# Altium integrated library VIETTIEN.IntLib: 167 symbols (part 4 of 8)

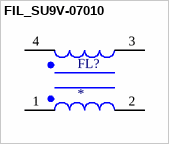
[diagram p69: symbol FIL_SU9V-07010]

## FIL_SU9V-07010
designator FL?
1 mH @ 1 kHz 2 Line Common Mode Choke Through Hole 700mA DCR 600mOhm; MF: Kemet; MP: SU9V-07010; SnapEDA_Link: https://www.snapeda.com/parts/SU9V-07010/Kemet/view-part/?ref=snap; Package: Vertical-4 Kemet; Value: *; Check_prices: https://www.snapeda.com/parts/SU9V-07010/Kemet/view-part/?ref=eda
footprint FIL_SU9V-07010
pins: 1, 2, 3, 4


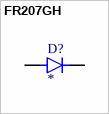
[diagram p70: symbol FR207GH]

## FR207GH
designator D?
500ns, 2A, 1000V, Fast Recovery Rectifier; MF: Taiwan Semiconductor Corporation; MP: FR207GH; SnapEDA_Link: https://www.snapeda.com/parts/FR207GH/Taiwan+Semiconductor/view-part/?ref=snap; Package: DO-15 Taiwan Semiconductor; Value: *; Check_prices: https://www.snapeda.com/parts/FR207GH/Taiwan+Semiconductor/view-part/?ref=eda
footprint DIOAD1300W80L670D310
pins: A, C K


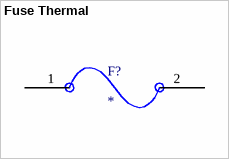
[diagram p71: symbol Fuse Thermal]

## Fuse Thermal
designator F?
Fuse, Resettable, Fast Acting, 10A, Sz 1206, 0.134x0.071x0.033", SMT, 24VDC, PCB | Bourns MF-NSMF200-2
footprint Fuse_thermal
pins: 1, 2


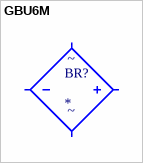
[diagram p72: symbol GBU6M]

## GBU6M
designator BR?
Bridge Rectifier Single Phase Standard 1 kV Through Hole GBU; MF: ON Semiconductor; MP: GBU6M; SnapEDA_Link: https://www.snapeda.com/parts/GBU6M/Onsemi/view-part/?ref=snap; Package: SIP-4 ON Semiconductor; Value: *; Check_prices: https://www.snapeda.com/parts/GBU6M/Onsemi/view-part/?ref=eda
footprint GBU_4L
pins: 1 (io), 2 (io), 3 (io), 4 (io)
text: ~


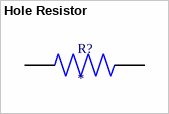
[diagram p73: symbol Hole Resistor]

## Hole Resistor
designator R?
X kOhms Â±1% 0.25W, 1/4W Through Hole Resistor Axial - Metal Film; MF: Yageo; MP: MFR-25FBF52-10K; SnapEDA_Link: https://www.snapeda.com/parts/MFR-25FBF52-10K/Yageo/view-part/?ref=snap; Package: RADIAL-2 YAGEO; Value: *; Check_prices: https://www.snapeda.com/parts/MFR-25FBF52-10K/Yageo/view-part/?ref=eda
footprint RESAD1100W55L680D260
pins: 1, 2


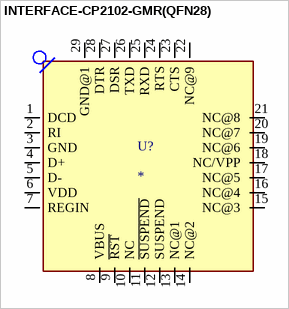
[diagram p74: symbol INTERFACE-CP2102-GMR(QFN28)]

## INTERFACE-CP2102-GMR(QFN28)
designator U?
USB Bridge, USB to UART USB 2.0 UART Interface 28-QFN (5x5); MP: CP2102-GMR; MF: Silicon; Price: None; Availability: In Stock; Package: VFQFN-28 Vishay Siliconix; SnapEDA_Link: https://www.snapeda.com/parts/CP2102-GMR/Silicon+Labs/view-part/?ref=snap; Check_prices: https://www.snapeda.com/parts/CP2102-GMR/Silicon+Labs/view-part/?ref=eda; Value: *; Purchase-URL: https://pricing.snapeda.com/search/part/CP2102-GMR/?ref=eda
footprint QFN28G_0.5-5X5MM
pins: 1 DCD (io), 2 RI (io), 3 GND (io), 4 D+ (io), 5 D- (io), 6 VDD (io), 7 REGIN (io), 8 VBUS (io), 9 ~{RST} (io), 10 NC (io), 11 ~{SUSPEND} (io), 12 SUSPEND (io), 13 NC@1 (io), 14 NC@2 (io), 15 NC@3 (io), 16 NC@4 (io), 17 NC@5 (io), 18 NC/VPP (io), 19 NC@6 (io), 20 NC@7 (io), 21 NC@8 (io), 22 NC@9 (io), 23 CTS (io), 24 RTS (io), 25 RXD (io), 26 TXD (io), 27 DSR (io), 28 DTR (io), 29 GND@1 (io)


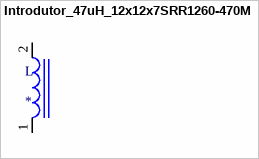
[diagram p75: symbol Introdutor_47uH_12x12x7SRR1260-470M]

## Introdutor_47uH_12x12x7SRR1260-470M
designator L
47ÂµH Shielded Wirewound Inductor 2.6A 86mOhm Max Nonstandard; MP: SRR1260-470M; MF: Bourns; Value: *; Package: Nonstandard Bourns; Price: None; SnapEDA_Link: https://www.snapeda.com/parts/SRR1260-470M/Bourns/view-part/283129/?ref=snap; Availability: Unavailable
footprint Introdutor_47uH_12x12x7
pins: 1, 2


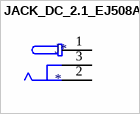
[diagram p76: symbol JACK_DC_2.1_EJ508A]

## JACK_DC_2.1_EJ508A
designator J*
Power Barrel Connector Jack 2.10mm ID _0.083_, 5.50mm OD _0.217_ Through Hole, Right Angle / EJ508A; MF: MPD; Package: Non-Standard MPD; Value: *; SnapEDA_Link: https://www.snapeda.com/parts/EJ508A/MPD%20%28Memory%20Protection%20Devices%29/view-part/474399/?ref=snap; Price: None; MP: EJ508A; Availability: Unavailable
footprint MPD_EJ508A
pins: 1, 2, 3


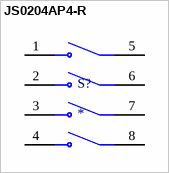
[diagram p77: symbol JS0204AP4-R]

## JS0204AP4-R
designator S?
Công Tắc DIP Switch Dán SMD 4 Bit 2.54mm; MP: JS0204AP4-R; Package: None; Price: None; Value: *; Availability: Unavailable
footprint SW_JS0204AP4-R
pins: 1, 2, 3, 4, 5, 6, 7, 8


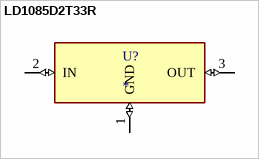
[diagram p78: symbol LD1085D2T33R]

## LD1085D2T33R
designator U?
Linear Voltage Regulator IC Positive Fixed 1 Output 3A D2PAK; MF: STMicroelectronics; MP: LD1085D2T33R; SnapEDA_Link: https://www.snapeda.com/parts/LD1085D2T33R/STMicroelectronics/view-part/?ref=snap; Package: TO-263-3 STMicroelectronics; Value: *; Check_prices: https://www.snapeda.com/parts/LD1085D2T33R/STMicroelectronics/view-part/?ref=eda
footprint LD1085D2T33R
pins: 1 GND (io), 2 IN (io), 3 OUT (io)


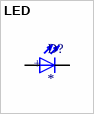
[diagram p79: symbol LED]

## LED
designator D?
WL-TMRC_5MM; MF: {'manufacturer': u'Wurth Electronics'}; MP: 151051RS11000; Package: None; Price: None; Value: *; Availability: Unavailable
footprint WL-TMRC_5MM
pins: 1 POS, 2 NEG
text: +


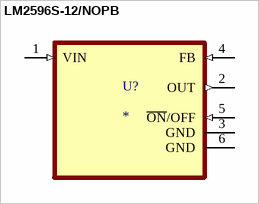
[diagram p80: symbol LM2596S-12/NOPB]

## LM2596S-12/NOPB
designator U?
SIMPLE SWITCHERÂ® 4.5V to 40V, 3A Low Component Count Step-Down Regulator; MF: Texas Instruments; MP: LM2596S-12/NOPB; SnapEDA_Link: https://www.snapeda.com/parts/LM2596S-12/NOPB/Texas+Instruments/view-part/?ref=snap; Package: TO-263-5 Texas Instruments; Value: *; Check_prices: https://www.snapeda.com/parts/LM2596S-12/NOPB/Texas+Instruments/view-part/?ref=eda
footprint VREG_LM2596S-12/NOPB
pins: 1 VIN (in), 2 OUT (out), 3 GND (power), 4 FB (in), 5 ~{ON}/OFF (in), 6 GND (power)


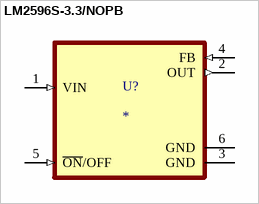
[diagram p81: symbol LM2596S-3.3/NOPB]

## LM2596S-3.3/NOPB
designator U?
SIMPLE SWITCHERÂ® 4.5V to 40V, 3A Low Component Count Step-Down Regulator 5-DDPAK/TO-263; MF: Texas Instruments; MP: LM2596S-3.3; SnapEDA_Link: https://www.snapeda.com/parts/LM2596S-3.3/Texas+Instruments/view-part/?ref=snap; Package: TO-263-5 Texas Instruments; Value: *; Check_prices: https://www.snapeda.com/parts/LM2596S-3.3/Texas+Instruments/view-part/?ref=eda
footprint VREG_LM2596S-3.3/NOPB
pins: 1 VIN (in), 2 OUT (out), 3 GND (power), 4 FB (in), 5 ~{ON}/OFF (in), 6 GND (power)


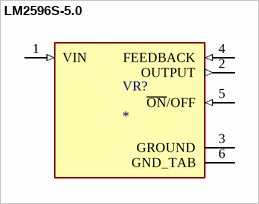
[diagram p82: symbol LM2596S-5.0]

## LM2596S-5.0
designator VR?
SIMPLE SWITCHERÂ® 4.5V to 40V, 3A Low Component Count Step-Down Regulator; MF: Texas Instruments; MP: LM2596S-5.0/NOPB; SnapEDA_Link: https://www.snapeda.com/parts/LM2596S-5.0/NOPB/Texas+Instruments/view-part/?ref=snap; Package: TO-263-5 Texas Instruments; Value: *; Check_prices: https://www.snapeda.com/parts/LM2596S-5.0/NOPB/Texas+Instruments/view-part/?ref=eda
footprint LM2596S-5.0
pins: 1 VIN (in), 2 OUTPUT (out), 3 GROUND (power), 4 FEEDBACK (in), 5 ~{ON}/OFF (in), 6 GND_TAB (power)


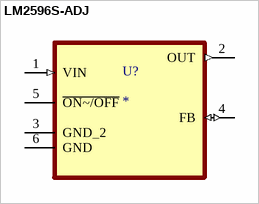
[diagram p83: symbol LM2596S-ADJ]

## LM2596S-ADJ
designator U?
Buck Switching Regulator IC Positive Adjustable 1.2V 1 Output 3A TO-263-6, DÂ²Pak (5 Leads + Tab), TO-263BA; MF: UMW; MP: LM2596S-ADJ; SnapEDA_Link: https://www.snapeda.com/parts/LM2596S-ADJ/Umwelt+Sensor+Teknik/view-part/?ref=snap; Package: None; Value: *; Check_prices: https://www.snapeda.com/parts/LM2596S-ADJ/Umwelt+Sensor+Teknik/view-part/?ref=eda
footprint LM2596S-ADJ
pins: 1 VIN (in), 2 OUT (out), 3 GND_2, 4 FB (io), 5 ~{ON~/OFF}, 6 GND


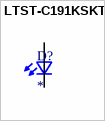
[diagram p84: symbol LTST-C191KSKT]

## LTST-C191KSKT
designator D?
Yellow 591nm LED Indication - Discrete 2.1V 0603 (1608 Metric); MF: Lite-On Inc.; MP: LTST-C191KSKT; SnapEDA_Link: https://www.snapeda.com/parts/LTST-C191KSKT/Lite-On/view-part/?ref=snap; Package: 0603 Lite-On Inc.; Value: *; Check_prices: https://www.snapeda.com/parts/LTST-C191KSKT/Lite-On/view-part/?ref=eda
footprint 0603
pins: 1 K2, 2 A2


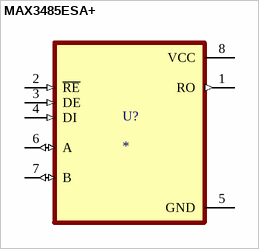
[diagram p85: symbol MAX3485ESA+]

## MAX3485ESA+
designator U?
3.3V Powered, 10Mbps and Slew-Rate Limited, True RS-485/RS-422 Transceivers; MF: Analog Devices; MP: MAX3485ESA+; SnapEDA_Link: https://www.snapeda.com/parts/MAX3485ESA+/Analog+Devices/view-part/?ref=snap; Package: SOIC-8 Maxim; Value: *; Check_prices: https://www.snapeda.com/parts/MAX3485ESA+/Analog+Devices/view-part/?ref=eda
footprint SOIC127P600X175-8N
pins: 1 RO (out), 2 ~{RE} (in), 3 DE (in), 4 DI (in), 5 GND (power), 6 A (io), 7 B (io), 8 VCC (power)


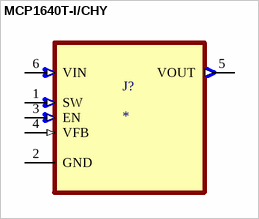
[diagram p86: symbol MCP1640T-I/CHY]

## MCP1640T-I/CHY
designator J?
Boost Switching Regulator IC Positive Adjustable 2V 1 Output 350mA SOT-23-6; MP: MCP1640T-I/CHY; MF: Microchip; SnapEDA_Link: https://www.snapeda.com/parts/MCP1640T-I/CHY/Microchip/view-part/?ref=snap; Availability: In Stock; Package: SOT-23-6 Microchip; Price: None; Check_prices: https://www.snapeda.com/parts/MCP1640T-I/CHY/Microchip/view-part/?ref=eda; Value: *; Purchase-URL: https://pricing.snapeda.com/search/part/MCP1640T-I/CHY/?ref=eda
footprint SOT95P270X145-6N
pins: 1 SW (in), 2 GND, 3 EN (in), 4 VFB (in), 5 VOUT (out), 6 VIN (in)


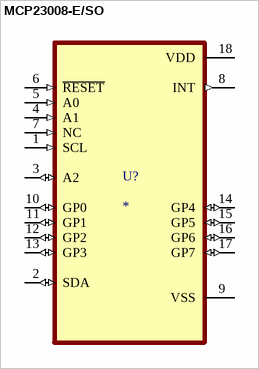
[diagram p87: symbol MCP23008-E/SO]

## MCP23008-E/SO
designator U?
8-BIT INPUT/OUTPUT EXPANDER, I2C INTERFACE | Microchip Technology Inc. MCP23008-E/SO; SnapEDA_Link: https://www.snapeda.com/parts/MCP23008-E/SO/Microchip+Technology/view-part/?ref=snap; Package: SOIC-18 Microchip; Value: *; MF: Microchip; MP: MCP23008-E/SO; Check_prices: https://www.snapeda.com/parts/MCP23008-E/SO/Microchip+Technology/view-part/?ref=eda
footprint SOIC127P1030X265-18N
pins: 1 SCL (in), 2 SDA (io), 3 A2 (io), 4 A1 (in), 5 A0 (in), 6 ~{RESET} (in), 7 NC (in), 8 INT (out), 9 VSS (power), 10 GP0 (io), 11 GP1 (io), 12 GP2 (io), 13 GP3 (io), 14 GP4 (io), 15 GP5 (io), 16 GP6 (io), 17 GP7 (io), 18 VDD (power)


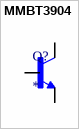
[diagram p88: symbol MMBT3904]

## MMBT3904
designator Q?
BJT, SOT-23, 40V, 200mA, NPN, 0.35W, 150Â°C; MF: Diotec Semiconductor; MP: MMBT3904; SnapEDA_Link: https://www.snapeda.com/parts/MMBT3904/Diotec/view-part/?ref=snap; Package: SOT-23 Diotec; Value: *; Check_prices: https://www.snapeda.com/parts/MMBT3904/Diotec/view-part/?ref=eda
footprint TRANS_MMBT3904
pins: 1 B, 2 E, 3 C


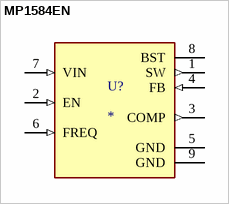
[diagram p89: symbol MP1584EN]

## MP1584EN
designator U?
Buck Switching Regulator IC Positive Adjustable 0.8V 1 Output 3A 8-SOIC (0.154, 3.90mm Width) Exposed Pad; MF: Monolithic Power; MP: MP1584EN; SnapEDA_Link: https://www.snapeda.com/parts/MP1584EN/Monolithic+Power+Systems/view-part/?ref=snap; Package: SOIC-8 Monolithic Power; Value: *; Check_prices: https://www.snapeda.com/parts/MP1584EN/Monolithic+Power+Systems/view-part/?ref=eda
footprint SOIC127P600X170-9N
pins: 1 SW (out), 2 EN (in), 3 COMP (out), 4 FB (in), 5 GND (power), 6 FREQ (in), 7 VIN (in), 8 BST, 9 GND (power)


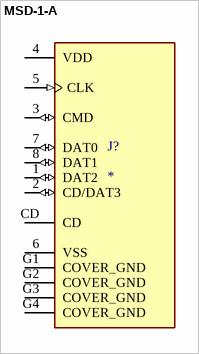
[diagram p90: symbol MSD-1-A]

## MSD-1-A
designator J?
Micro SD Card Connector, 9 Positions, Connector and Ejector, Push In, Auto Eject Out, Surface Mount, 1.8 mm Height Above Board, Gold Flash; MF: Same Sky; MP: MSD-1-A; SnapEDA_Link: https://www.snapeda.com/parts/MSD-1-A/Same+Sky/view-part/?ref=snap; Package: None; Value: *; Check_prices: https://www.snapeda.com/parts/MSD-1-A/Same+Sky/view-part/?ref=eda
footprint CUI_MSD-1-A
pins: 1 DAT2 (io), 2 CD/DAT3 (io), 3 CMD (io), 4 VDD (power), 5 CLK (in), 6 VSS (power), 7 DAT0 (io), 8 DAT1 (io), CD, G1 COVER_GND (power), G2 COVER_GND (power), G3 COVER_GND (power), G4 COVER_GND (power)


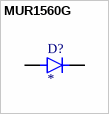
[diagram p91: symbol MUR1560G]

## MUR1560G
designator D?
Diode Standard 600 V 15A Through Hole TO-220-2; MF: ON Semiconductor; MP: MUR1560G; Check_prices: https://www.snapeda.com/parts/MUR1560G/Onsemi/view-part/?ref=eda; Value: *; Purchase-URL: https://pricing.snapeda.com/search/part/MUR1560G/?ref=eda; Price: None; Package: TO-220-2 ON Semiconductor; Availability: In Stock; SnapEDA_Link: https://www.snapeda.com/parts/MUR1560G/Onsemi/view-part/?ref=snap
footprint TO508P997X444X1905-2
pins: 1 K, 3 A
